# Altium footprint library Cole_.PcbLib: 175 footprints (part 1 of 11)
Each footprint in its own frame and in the unit in brackets; x right, y up, seen from the top. Pads: shape width x height; smd on the part's side, far side on the other; paste and mask are expansions set on the pad; w line width, h text height; cw(c..) or ccw(c..) is an arc to the next point about the centre after c.
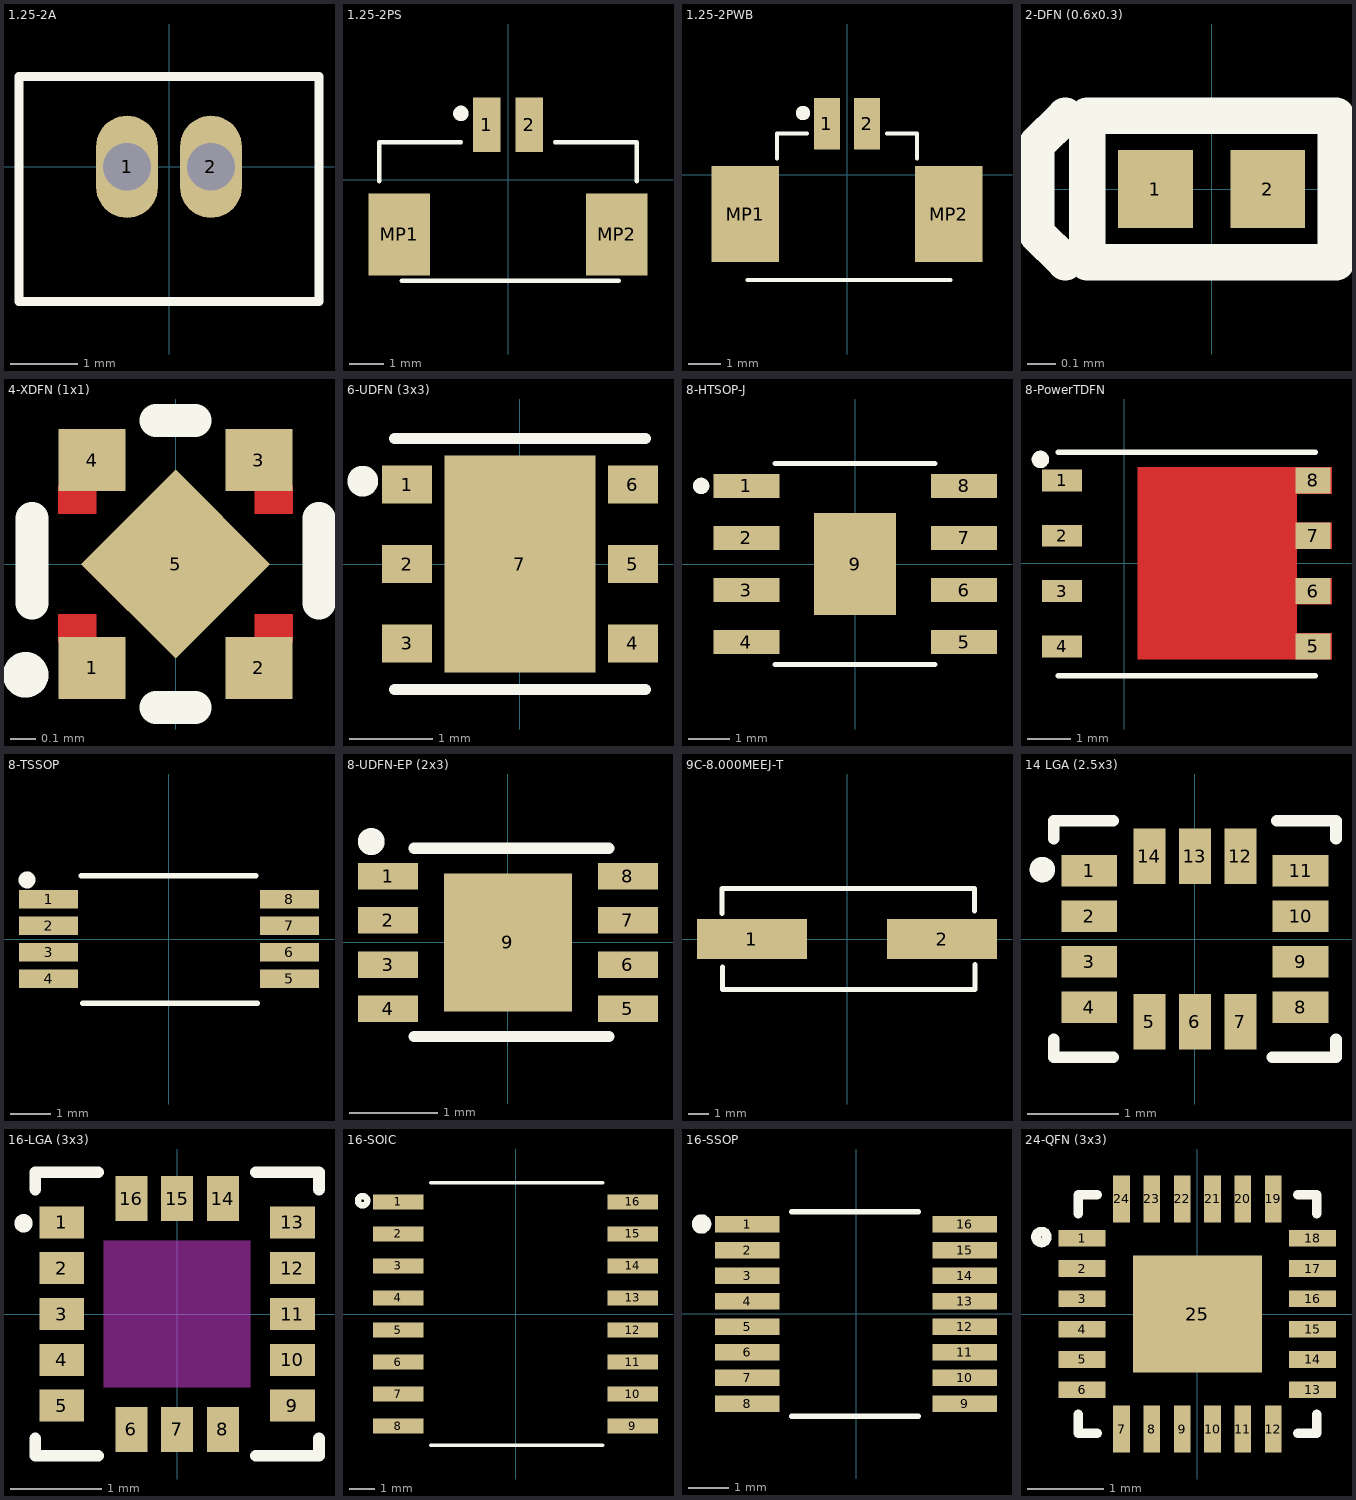
[diagram p0: the footprints below, top view; thin cyan lines are the x and y axes]

## 1.25-2A [mm]
pads (2):
  oval 0.92x1.524 hole 0.71: 1(-0.625,0) 2(0.625,0)
Top Overlay:
  lines w0.127: -2.235,-2.007 -2.235,1.346 2.235,1.346 2.235,-2.007 -2.235,-2.007
3D body "DEALON 1.25-2A.STEP": height 4.6, standoff -2.26, extent -2.2,-1.956 2.2,1.344

## 1.25-2PS [mm]
pads (4):
  rect 0.8x1.6 smd: 1(-0.625,1.6) 2(0.625,1.6)
  rect 1.8x2.4 smd: MP1(-3.175,-1.6) MP2(3.175,-1.6)
Top Overlay:
  circle w0.4: c-1.372,1.93 r0.025
  lines w0.127: -3.759,-0.051 -3.759,1.092 -1.372,1.092 ; -3.099,-2.946 3.226,-2.946 ; 1.372,1.092 3.759,1.092 3.759,-0.051
3D body "1.25-2PS.STEP": height 4.91, standoff 0, extent -3.75,-2.427 3.751,1.873

## 1.25-2PWB [mm]
pads (4):
  rect 0.8x1.6 smd: 1(-0.625,1.6) 2(0.625,1.6)
  rect 2.1x3 smd: MP1(-3.175,-1.219) MP2(3.175,-1.219)
Top Overlay:
  circle w0.4: c-1.372,1.93 r0.025
  lines w0.127: -3.099,-3.277 3.226,-3.277 ; -2.184,0.508 -2.184,1.295 -1.245,1.295 ; 1.245,1.295 2.184,1.295 2.184,0.508
3D body "DEALON 1.25-2PWB.STEP": height 3.5, standoff 0, extent -3.625,-3.205 3.625,2.045

## 2-DFN (0.6x0.3) [mm]
pads (2):
  rect 0.26x0.27 smd mask+0.055: 1(-0.195,0) 2(0.195,0)
Top Overlay:
  lines w0.127: -0.508,-0.254 -0.61,-0.152 -0.61,0.152 -0.508,0.254 ; -0.432,-0.254 0.432,-0.254 0.432,0.254 -0.432,0.254 -0.432,-0.254
3D body "ESDM2032MX4T5G.STEP": height 0.3, standoff 0, extent -0.3,-0.15 0.3,0.15

## 4-XDFN (1x1) [mm]
pads (5):
  rect 0.26x0.24 smd mask+0.055: 1(-0.325,-0.405) 2(0.325,-0.405) 3(0.325,0.405) 4(-0.325,0.405)
  rect 0.52x0.52 smd rot 45 mask+0.055: 5(0,0)
Top Layer:
  region: 0.457,0.305 0.307,0.305 0.307,0.195 0.457,0.195
  rectangle: -0.457,0.195 -0.307,0.305
  region: 0.457,-0.195 0.307,-0.195 0.307,-0.305 0.457,-0.305
  rectangle: -0.457,-0.305 -0.307,-0.195
Top Overlay:
  circle w0.127: c-0.584,-0.432 r0.025
  lines w0.127: -0.559,-0.152 -0.559,0.178 ; -0.076,-0.559 0.076,-0.559 ; -0.076,0.559 0.076,0.559 ; 0.559,-0.152 0.559,0.178
3D body "NCP161AMX280TBG.STEP": height 0.39, standoff -0.04, extent -0.5,-0.5 0.5,0.5

## 6-UDFN (3x3) [mm]
pads (7):
  rect 0.6x0.45 smd mask+0.055: 1(-1.35,0.95) 2(-1.35,0) 3(-1.35,-0.95) 4(1.35,-0.95) 5(1.35,0) 6(1.35,0.95)
  rect 1.8x2.6 smd mask+0.055: 7(0,0)
Top Overlay:
  circle w0.254: c-1.88,0.991 r0.057
  lines w0.127: -1.5,-1.5 0,-1.5 1.5,-1.5 ; -1.5,1.5 0,1.5 1.5,1.5
3D body "UDFN6_3X3_ONS.step": height 0.56, standoff 0, extent -1.499,-1.499 1.499,1.499

## 8-HTSOP-J [mm]
pads (9):
  rect 1.61x0.58 smd: 1(-2.655,1.905) 2(-2.655,0.635) 3(-2.655,-0.635) 4(-2.655,-1.905) 5(2.655,-1.905) 6(2.655,-0.635) 7(2.655,0.635) 8(2.655,1.905)
  rect 2x2.5 smd paste-2: 9(0,0)
Top Overlay:
  circle w0.2: c-3.759,1.905 r0.1
  lines w0.127: -1.95,-2.45 1.95,-2.45 ; -1.95,2.45 1.95,2.45
Top Paste:
  region: 0.635,-0.77 -0.635,-0.77 -0.635,0.77 0.635,0.77
3D body "HTSOP-J8.STEP": height 1.08, standoff 0, extent -3.012,-2.45 3.012,2.45

## 8-PowerTDFN [mm] "MOSFET N-CH 80V 74A TDSON"
pads (8):
  rect 0.925x0.5 smd paste-1: 1(-1.432,1.905) 2(-1.432,0.635) 3(-1.432,-0.635) 4(-1.432,-1.905)
  rect 0.8x0.6 smd paste-1: 5(4.331,-1.905) 6(4.331,-0.635) 7(4.331,0.635) 8(4.331,1.905)
Top Layer:
  region: 4.758,1.605 3.958,1.605 3.958,0.935 4.758,0.935 4.758,0.335 3.958,0.335 3.958,-0.335 4.758,-0.335 4.758,-0.935 3.958,-0.935 3.958,-1.605 4.758,-1.605 4.758,-2.205 0.303,-2.205 0.303,2.205 4.758,2.205
Top Overlay:
  circle w0.2: c-1.93,2.388 r0.1
  lines w0.127: -1.517,-2.575 4.383,-2.575 ; -1.517,2.55 4.383,2.55
Top Paste:
  region: 2.058,-1.6 0.558,-1.6 0.558,-0.1 2.058,-0.1
  region: 2.058,0.1 0.558,0.1 0.558,1.6 2.058,1.6
  region: 3.758,0.1 2.258,0.1 2.258,1.6 3.758,1.6
  region: 4.708,-2.155 3.958,-2.155 3.958,-1.655 4.708,-1.655
  region: 4.708,-0.885 3.958,-0.885 3.958,-0.385 4.708,-0.385
  region: 4.708,0.385 3.958,0.385 3.958,0.885 4.708,0.885
  region: -1.02,-2.105 -1.845,-2.105 -1.845,-1.705 -1.02,-1.705
  region: -1.02,-0.835 -1.845,-0.835 -1.845,-0.435 -1.02,-0.435
  region: -1.02,0.435 -1.845,0.435 -1.845,0.835 -1.02,0.835
  region: -1.02,1.705 -1.845,1.705 -1.845,2.105 -1.02,2.105
  region: 3.758,-1.6 2.258,-1.6 2.258,-0.1 3.758,-0.1
  region: 4.708,1.655 3.958,1.655 3.958,2.155 4.708,2.155
Top Solder:
  region: 4.858,1.505 4.058,1.505 4.058,1.035 4.858,1.035 4.858,0.235 4.058,0.235 4.058,-0.235 4.858,-0.235 4.858,-1.035 4.058,-1.035 4.058,-1.505 4.858,-1.505 4.858,-2.305 0.203,-2.305 0.203,2.305 4.858,2.305
3D body "User Library-DQH0008A.STEP": height 1.05, standoff 0, extent -1.603,-2.525 4.397,2.475

## 8-TSSOP [mm] "IC SENSOR THERMAL 3.0V 8TSSOP"
pads (8):
  rect 1.45x0.45 smd: 1(-2.95,0.975) 2(-2.95,0.325) 3(-2.95,-0.325) 4(-2.95,-0.975) 5(2.95,-0.975) 6(2.95,-0.325) 7(2.95,0.325) 8(2.95,0.975)
Top Overlay:
  circle w0.254: c-3.48,1.448 r0.08
  lines w0.127: -2.159,1.549 2.134,1.549 ; -2.121,-1.575 2.172,-1.575
3D body "User Library-TSSOP-8.STEP": height 1.2, standoff 0, extent -3.2,-1.5 3.2,1.5

## 8-UDFN-EP (2x3) [mm]
pads (9):
  rect 0.68x0.3 smd: 1(-1.36,0.75) 2(-1.36,0.25) 3(-1.36,-0.25) 4(-1.36,-0.75) 5(1.36,-0.75) 6(1.36,-0.25) 7(1.36,0.25) 8(1.36,0.75)
  rect 1.45x1.56 smd: 9(0,0)
Top Overlay:
  circle w0.254: c-1.549,1.143 r0.025
  lines w0.127: -1.067,-1.067 1.143,-1.067 ; -1.067,1.067 1.143,1.067
3D body "UDFN8_2X3_ONS.step": height 0.81, standoff 0, extent -1.549,-1.003 1.549,1.003

## 9C-8.000MEEJ-T [mm] "CRYSTAL 8.0000MHZ 18PF SMD"
pads (2):
  rect 5.5x2 smd: 1(-4.75,0) 2(4.75,0)
Top Overlay:
  lines w0.254: -6.248,1.27 -6.248,2.515 6.375,2.515 6.375,1.397 ; -6.223,-1.397 -6.223,-2.515 6.401,-2.515 6.401,-1.27
3D body "User Library-HC-49S.step": height 4.36, standoff 0.01, extent -6.074,-2.35 6.226,2.35

## 14 LGA (2.5x3) [mm]
pads (14):
  rect 0.61x0.35 smd paste+0 mask+0.055: 1(-1.16,0.75) 2(-1.16,0.25) 3(-1.16,-0.25) 4(-1.16,-0.75) 8(1.16,-0.75) 9(1.16,-0.25) 10(1.16,0.25) 11(1.16,0.75)
  rect 0.35x0.61 smd paste+0 mask+0.055: 5(-0.5,-0.91) 6(0,-0.91) 7(0.5,-0.91) 12(0.5,0.91) 13(0,0.91) 14(-0.5,0.91)
Top Overlay:
  circle w0.14: c-1.676,0.762 r0.07
  lines w0.127: -1.55,-1.1 -1.55,-1.3 -0.9,-1.3 ; -1.55,1.1 -1.55,1.3 -0.9,1.3 ; 0.85,-1.3 1.55,-1.3 1.55,-1.1 ; 0.9,1.3 1.55,1.3 1.55,1.1
3D body "ICM-20600--3DModel-STEP-56544.STEP": height 0.95, standoff -0.02, extent -1.5,-1.25 1.5,1.25

## 16-LGA (3x3) [mm]
pads (16):
  rect 0.49x0.35 smd: 1(-1.26,1) 2(-1.26,0.5) 3(-1.26,0) 4(-1.26,-0.5) 5(-1.26,-1) 9(1.26,-1) 10(1.26,-0.5) 11(1.26,0) 12(1.26,0.5) 13(1.26,1)
  rect 0.35x0.49 smd: 6(-0.5,-1.26) 7(0,-1.26) 8(0.5,-1.26) 14(0.5,1.26) 15(0,1.26) 16(-0.5,1.26)
Top Overlay:
  circle w0.1: c-1.676,0.991 r0.05
  lines w0.127: -1.55,-1.36 -1.55,-1.55 -0.86,-1.55 ; -1.55,1.36 -1.55,1.55 -0.86,1.55 ; 0.86,-1.55 1.55,-1.55 1.55,-1.36 ; 0.86,1.55 1.55,1.55 1.55,1.36
Keep-Out Layer:
  region: 0.8,-0.8 -0.8,-0.8 -0.8,0.8 0.8,0.8
  region: 0.8,-0.8 -0.8,-0.8 -0.8,0.8 0.8,0.8
3D body "IAM-20680.STEP": height 0.78, standoff -0.02, extent -1.5,-1.5 1.5,1.5

## 16-SOIC [mm]
pads (16):
  rect 2x0.6 smd: 1(-4.65,4.445) 2(-4.65,3.175) 3(-4.65,1.905) 4(-4.65,0.635) 5(-4.65,-0.635) 6(-4.65,-1.905) 7(-4.65,-3.175) 8(-4.65,-4.445) 9(4.65,-4.445) 10(4.65,-3.175) 11(4.65,-1.905) 12(4.65,-0.635) 13(4.65,0.635) 14(4.65,1.905) 15(4.65,3.175) 16(4.65,4.445)
Top Overlay:
  circle w0.254: c-6.071,4.496 r0.183
  lines w0.127: -3.378,-5.207 3.454,-5.207 ; -3.378,5.207 3.454,5.207
3D body "DW0016A.stp": height 2.59, standoff 0, extent -5.167,-5.15 5.167,5.15

## 16-SSOP [mm]
pads (16):
  rect 1.6x0.41 smd: 1(-2.7,2.222) 2(-2.7,1.587) 3(-2.7,0.953) 4(-2.7,0.318) 5(-2.7,-0.318) 6(-2.7,-0.953) 7(-2.7,-1.587) 8(-2.7,-2.222) 9(2.7,-2.222) 10(2.7,-1.587) 11(2.7,-0.953) 12(2.7,-0.318) 13(2.7,0.318) 14(2.7,0.953) 15(2.7,1.587) 16(2.7,2.222)
Top Overlay:
  circle w0.254: c-3.835,2.235 r0.114
  lines w0.127: -1.6,-2.54 1.549,-2.54 ; -1.6,2.54 1.549,2.54
3D body "User Library-SSOP16.step": height 1.1, standoff 0, extent -2.997,-2.489 2.997,2.489

## 24-QFN (3x3) [mm]
pads (25):
  rect 0.62x0.22 smd: 1(-1.52,1) 2(-1.52,0.6) 3(-1.52,0.2) 4(-1.52,-0.2) 5(-1.52,-0.6) 6(-1.52,-1) 13(1.52,-1) 14(1.52,-0.6) 15(1.52,-0.2) 16(1.52,0.2) 17(1.52,0.6) 18(1.52,1)
  rect 0.22x0.62 smd: 7(-1,-1.52) 8(-0.6,-1.52) 9(-0.2,-1.52) 10(0.2,-1.52) 11(0.6,-1.52) 12(1,-1.52) 19(1,1.52) 20(0.6,1.52) 21(0.2,1.52) 22(-0.2,1.52) 23(-0.6,1.52) 24(-1,1.52)
  rect 1.7x1.54 smd: 25(0,0)
Top Overlay:
  circle w0.127: c-2.057,1.016 r0.072
  lines w0.127: -1.574,-1.324 -1.574,-1.574 -1.324,-1.574 ; -1.574,1.324 -1.574,1.574 -1.324,1.574 ; 1.324,-1.574 1.574,-1.574 1.574,-1.324 ; 1.324,1.574 1.574,1.574 1.574,1.324
Top Paste:
  region: 0.08,-0.08 0.69,-0.08 0.69,-0.611 0.08,-0.611
  region: -0.691,-0.08 -0.08,-0.08 -0.08,-0.611 -0.691,-0.611
  region: 0.08,0.61 0.69,0.61 0.69,0.08 0.08,0.08
  region: -0.691,0.61 -0.08,0.61 -0.08,0.08 -0.691,0.08
3D body "ICM-20948--3DModel-STEP-56544.STEP": height 1.03, standoff -0.02, extent -1.5,-1.501 1.5,1.499